# Altium footprint library PcbLib1.PcbLib: 8 footprints
Each footprint in its own frame and in the unit in brackets; x right, y up, seen from the top. Pads: shape width x height; smd on the part's side, far side on the other; paste and mask are expansions set on the pad; w line width, h text height; cw(c..) or ccw(c..) is an arc to the next point about the centre after c.
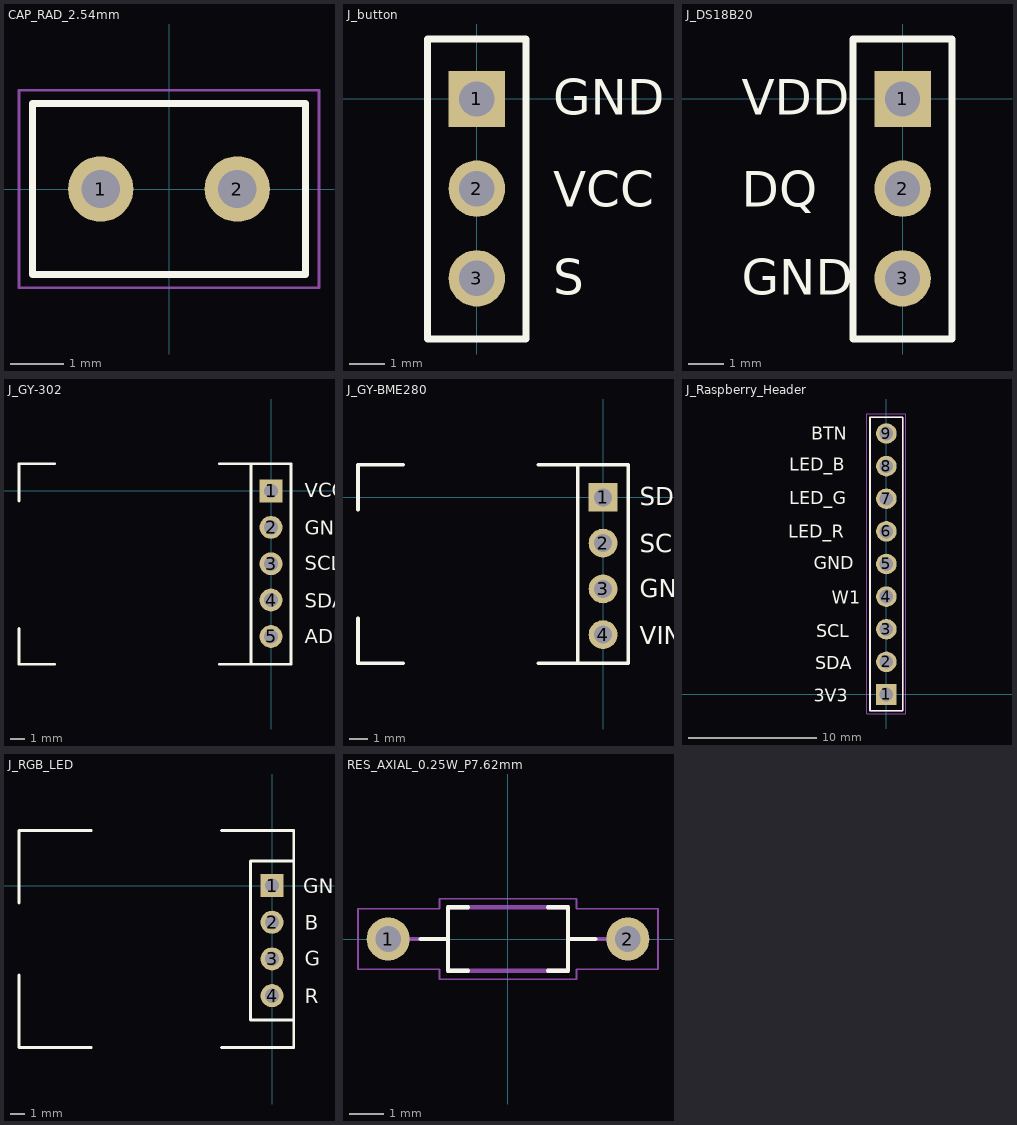
[diagram p0: the footprints below, top view; thin cyan lines are the x and y axes]

## CAP_RAD_2.54mm [mm]
pads (2):
  round 1.218 hole 0.71 mask+0.102: 1(-1.27,0) 2(1.27,0)
Top Overlay:
  lines w0.127: -2.54,-1.587 2.54,-1.587 2.54,1.587 -2.54,1.587 -2.54,-1.587
Mechanical 13:
  lines w0.127: -2.54,-1.587 2.54,-1.587 2.54,1.587 -2.54,1.587 -2.54,-1.587
Mechanical 15:
  lines w0.05: -2.79,-1.837 2.79,-1.837 2.79,1.837 -2.79,1.837 -2.79,-1.837
3D body "step_temp.STEP": height 5.08, standoff -25.4, extent -2.54,-1.587 2.54,1.587

## J_button [mm]
pads (3):
  rect 1.6x1.6 hole 1: 1(0,0)
  round 1.6 hole 1: 2(0,-2.54) 3(0,-5.08)
Top Overlay:
  lines w0.2: -1.4,-6.8 -1.4,1.7 1.4,1.7 1.4,-6.8 -1.4,-6.8
  text "S" at 2.17,-5.55 h1
  text "VCC" at 2.17,-3.05 h1
  text "GND" at 2.17,-0.45 h1

## J_DS18B20 [mm]
pads (3):
  rect 1.6x1.6 hole 1: 1(0,0)
  round 1.6 hole 1: 2(0,-2.54) 3(0,-5.08)
Top Overlay:
  lines w0.2: -1.4,-6.8 1.4,-6.8 1.4,1.7 -1.4,1.7 -1.4,-6.8
  text "VDD" at -4.55,-0.45 h1
  text "DQ" at -4.55,-3.05 h1
  text "GND" at -4.55,-5.55 h1
3D body "PPPC031LFBNRC--3DModel-STEP-269445.STEP": height 8.51, standoff -3.2, extent -1.27,-6.604 1.27,1.524

## J_GY-302 [mm]
pads (5):
  rect 1.6x1.6 hole 1: 1(0,0)
  round 1.6 hole 1: 2(0,-2.54) 3(0,-5.08) 4(0,-7.62) 5(0,-10.16)
Top Overlay:
  lines w0.2: -17.6,-9.6 -17.6,-12.1 -15.1,-12.1 ; -17.6,-0.7 -17.6,1.9 -15.1,1.9 ; -3.6,-12.1 1.4,-12.1 1.4,1.9 -3.6,1.9 ; -1.4,-12.1 -1.4,1.9
  text "ADDR" at 2.35,-10.65 h1
  text "SCL" at 2.35,-5.55 h1
  text "SDA" at 2.35,-8.15 h1
  text "GND" at 2.35,-3.05 h1
  text "VCC" at 2.35,-0.45 h1
3D body "female_2_54mm_5p.STEP": height 8.51, standoff -3.2, extent -1.27,-11.684 1.27,1.524

## J_GY-BME280 [mm]
pads (4):
  rect 1.6x1.6 hole 1: 1(0,0)
  round 1.6 hole 1: 2(0,-2.54) 3(0,-5.08) 4(0,-7.62)
Top Overlay:
  lines w0.2: -13.6,-6.7 -13.6,-9.2 -11.1,-9.2 ; -13.6,-0.7 -13.6,1.8 ; -11.1,1.8 -13.6,1.8 ; -3.6,-9.2 1.4,-9.2 1.4,1.8 -3.6,1.8 ; -1.4,-9.2 -1.4,1.8 ; -13.6,1.8 -13.6,1.8
  text "SDA" at 2.05,-0.45 h1
  text "SCL" at 2.05,-3.05 h1
  text "VIN" at 2.05,-8.15 h1
  text "GND" at 2.05,-5.55 h1
3D body "female_2_54mm_4p.STEP": height 8.51, standoff -3.2, extent -1.27,-9.134 1.27,1.534

## J_Raspberry_Header [mm]
pads (9):
  rect 1.605x1.605 / inner round 1.605 / far side rect 1.605x1.605 hole 1.07: 1(0,0)
  round 1.605 hole 1.07: 2(0,2.54) 3(0,5.08) 4(0,7.62) 5(0,10.16) 6(0,12.7) 7(0,15.24) 8(0,17.78) 9(0,20.32)
Top Overlay:
  lines w0.127: -1.27,-1.27 1.27,-1.27 1.27,21.59 -1.27,21.59 -1.27,-1.27
  text "SCL" at -5.45,4.45 h1
  text "W1" at -4.25,7.05 h1
  text "LED_G" at -7.55,14.817 h1
  text "LED_R" at -7.65,12.217 h1
  text "GND" at -5.65,9.75 h1
  text "LED_B" at -7.55,17.417 h1
  text "BTN" at -5.85,19.85 h1
  text "SDA" at -5.55,1.95 h1
  text "3V3" at -5.65,-0.55 h1
Mechanical 13:
  lines w0.127: -1.27,-1.27 1.27,-1.27 1.27,21.59 -1.27,21.59 -1.27,-1.27
Mechanical 15:
  lines w0.05: -1.52,-1.52 1.52,-1.52 1.52,21.84 -1.52,21.84 -1.52,-1.52
3D body "step_temp.STEP": height 8.74, standoff -3, extent -1.27,-1.27 1.27,21.59

## J_RGB_LED [mm]
pads (4):
  rect 1.6x1.6 hole 1: 1(0,0)
  round 1.6 hole 1: 2(0,-2.54) 3(0,-5.08) 4(0,-7.62)
Top Overlay:
  lines w0.2: -17.5,-6.2 -17.5,-11.2 -12.5,-11.2 ; -17.5,-1.2 -17.5,3.8 -12.5,3.8 ; -3.5,-11.2 1.5,-11.2 1.5,3.8 -3.5,3.8 ; 1.5,-9.3 -1.5,-9.3 -1.5,1.7 1.5,1.7
  text "GND" at 2.15,-0.55 h1
  text "R" at 2.25,-8.15 h1
  text "G" at 2.25,-5.55 h1
  text "B" at 2.25,-3.05 h1
3D body "female_2_54mm_4p.STEP": height 8.51, standoff -3.2, extent -1.295,-9.1 1.245,1.568

## RES_AXIAL_0.25W_P7.62mm [mm]
pads (2):
  round 1.258 hole 0.75 mask+0.102: 1(-3.5,0) 2(3.5,0)
Top Overlay:
  lines w0.127: -2.55,0 -1.75,0 ; -1.17,-0.925 -1.75,-0.925 -1.75,0 ; -1.17,0.925 -1.75,0.925 -1.75,0 ; 1.17,-0.925 1.75,-0.925 1.75,0 ; 1.17,0.925 1.75,0.925 1.75,0 ; 2.55,0 1.75,0
Mechanical 13:
  lines w0.127: -2.925,0 -1.75,0 ; 2.925,0 1.75,0 ; -1.75,0 -1.75,0.925 1.75,0.925 1.75,0 ; -1.75,0 -1.75,-0.925 1.75,-0.925 1.75,0
Mechanical 15:
  lines w0.05: -4.38,-0.88 -4.38,0.88 -2,0.88 -2,1.175 2,1.175 2,0.88 4.38,0.88 4.38,-0.88 2,-0.88 2,-1.175 -2,-1.175 -2,-0.88 -4.38,-0.88
3D body "step_temp.STEP": height 0.92, standoff -0.92, extent -3.75,-0.918 3.75,0.918